# Altium footprint library Miscellaneous Devices.PcbLib: 306 footprints (part 1 of 20)
Each footprint in its own frame and in the unit in brackets; x right, y up, seen from the top. Pads: shape width x height; smd on the part's side, far side on the other; paste and mask are expansions set on the pad; w line width, h text height; cw(c..) or ccw(c..) is an arc to the next point about the centre after c.
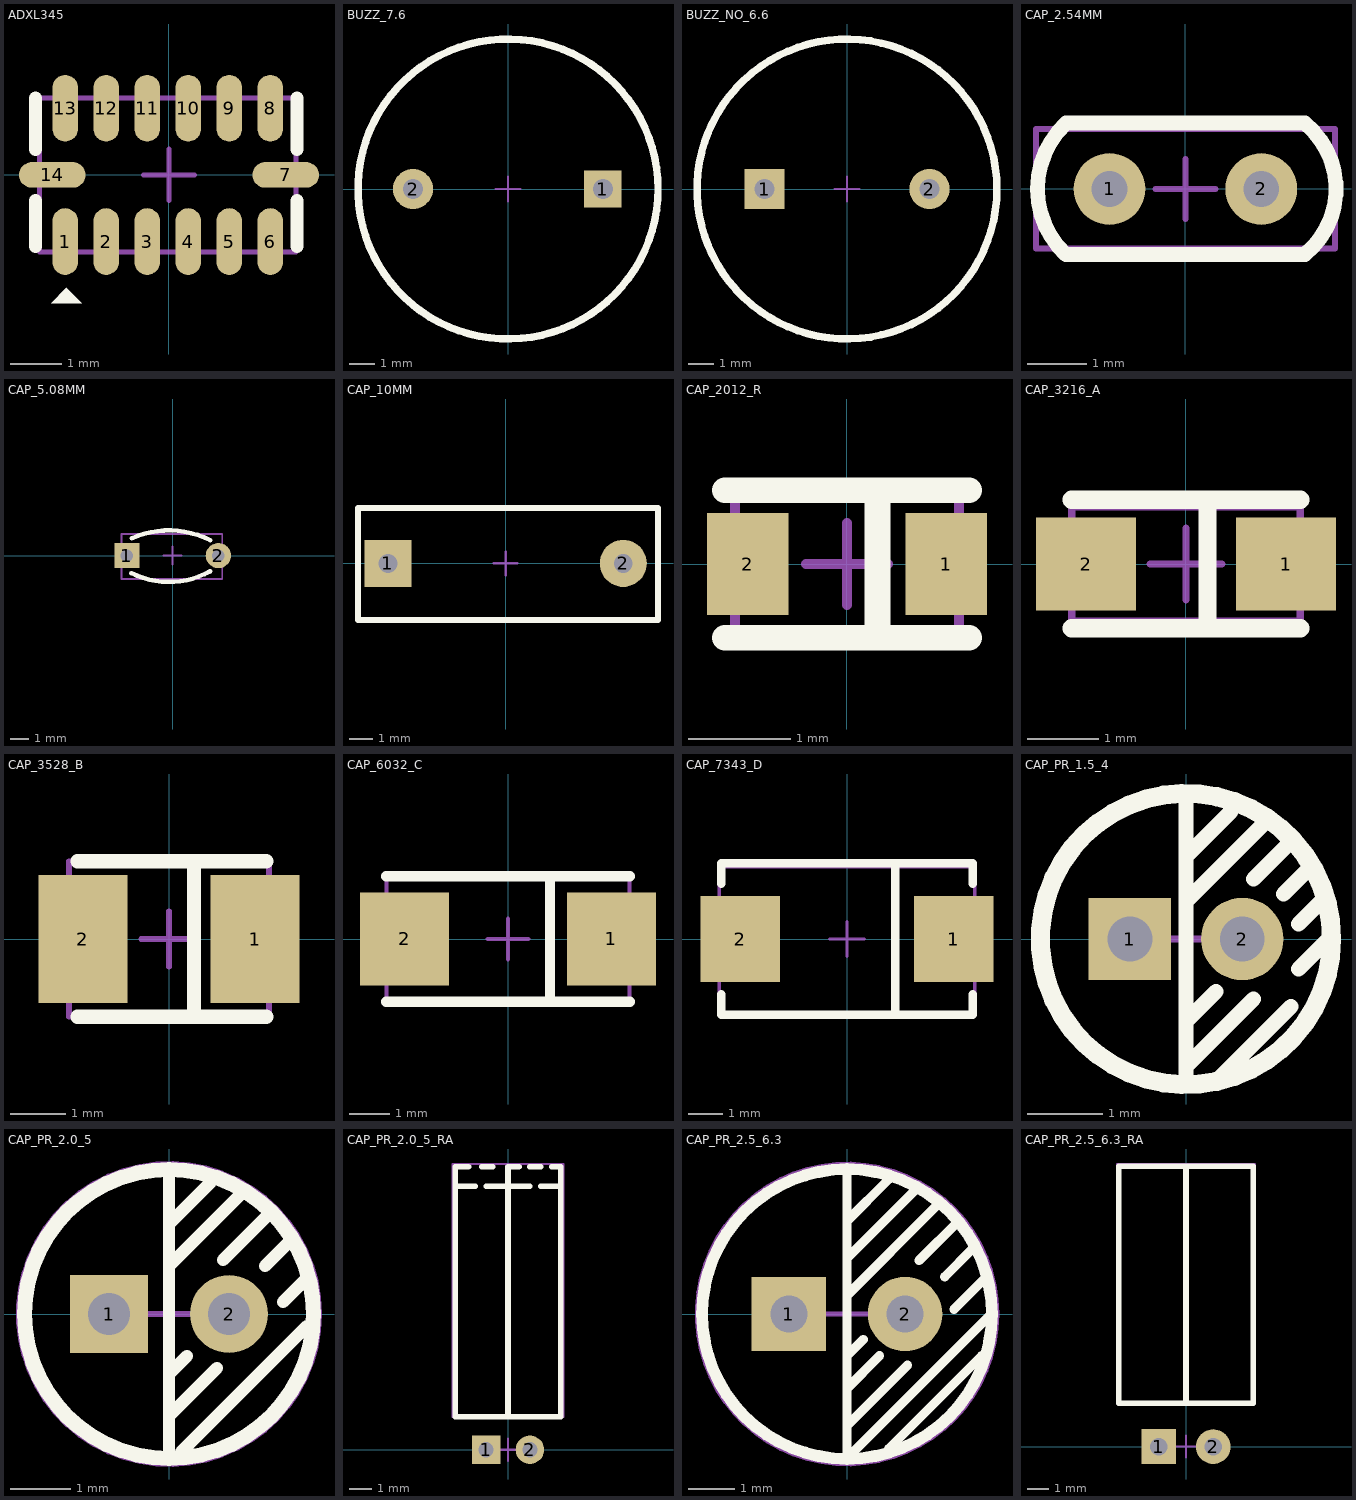
[diagram p0: the footprints below, top view; thin cyan lines are the x and y axes]

## ADXL345 [mm]
pads (14):
  oval 0.5x1.3 smd: 1(-2.025,-1.3) 2(-1.225,-1.3) 3(-0.425,-1.3) 4(0.375,-1.3) 5(1.175,-1.3) 6(1.975,-1.3) 8(1.975,1.3) 9(1.175,1.3) 10(0.375,1.3) 11(-0.425,1.3) 12(-1.225,1.3) 13(-2.025,1.3)
  oval 1.3x0.5 smd: 7(2.275,0) 14(-2.275,0)
Top Overlay:
  region: -2,-2.2 -2.3,-2.5 -1.7,-2.5
  lines w0.254: -2.6,-1.4 -2.6,-0.5 ; -2.6,0.5 -2.6,1.5 ; 2.5,-1.4 2.5,-0.5 ; 2.5,0.5 2.5,1.5
Mechanical 15:
  lines w0.1: -0.5,0 0.5,0 ; 0,-0.5 0,0.5 ; -2.525,-1.5 2.475,-1.5 2.475,1.5 -2.525,1.5 -2.525,-1.5
3D body: height 1, standoff 0, extent -2.525,-1.5 2.475,1.5

## BUZZ_7.6 [mm]
pads (2):
  rect 1.5x1.5 hole 0.8: 1(3.8,0)
  round 1.6 hole 0.8: 2(-3.8,0)
Top Overlay:
  circle w0.3: c0,0 r6
Mechanical 15:
  circle w0.1: c0,0 r6
  lines w0.1: -0.5,0 0.5,0 ; 0,-0.5 0,0.5
3D body: height 9.75, standoff -4.4, extent -6,-6 9.454,6

## BUZZ_NO_6.6 [mm]
pads (2):
  rect 1.6x1.6 hole 0.8: 1(-3.3,0)
  round 1.6 hole 0.8: 2(3.3,0)
Top Overlay:
  circle w0.3: c0,0 r6
Mechanical 15:
  circle w0.1: c0,0 r6.003
  lines w0.1: -0.5,0 0.5,0 ; 0,-0.5 0,0.5
3D body: height 8.6, standoff -5.4, extent -6,-6 6,6

## CAP_2.54MM [mm]
pads (2):
  round 1.2 hole 0.6: 1(-1.27,0) 2(1.27,0)
Top Overlay:
  lines w0.25: -2,1.097 ccw(c-0.972,-0.002) -2,-1.1 2,-1.1 ; -2,1.1 2,1.1 ; 1.999,-1.099 ccw(c1.1,0) 1.999,1.099
Mechanical 15:
  lines w0.1: -0.5,0 0.5,0 ; 0,-0.5 0,0.5 ; -2.5,-1 -2.5,1 2.5,1 2.5,-1 -2.5,-1
3D body: height 5.92, standoff -2, extent -2.919,-0.836 2.919,0.86

## CAP_5.08MM [mm]
pads (2):
  rect 1.4x1.4 hole 0.7: 1(-2.54,0)
  round 1.4 hole 0.7: 2(2.54,0)
Top Overlay:
  lines w0.254: -2.286,-0.972 ccw(c-0.2,3.2) 2.082,-0.868 ; -2.28,0.955 cw(c-0.2,-3.7) 2.08,0.861
Mechanical 15:
  lines w0.1: -0.5,0 0.5,0 ; 0,-0.5 0,0.5 ; -2.84,-1.3 2.76,-1.3 2.76,1.2 -2.84,1.2 -2.84,-1.3
3D body: height 6, standoff -3, extent -2.84,-1.3 2.76,1.2

## CAP_10MM [mm]
pads (2):
  rect 2x2 hole 0.8: 1(-5,0)
  round 2 hole 0.8: 2(5,0)
Top Overlay:
  lines w0.254: -6.275,-2.4 -6.275,2.351 6.475,2.351 6.475,-2.4 -6.275,-2.4
Mechanical 15:
  lines w0.1: -0.5,0 0.5,0 ; 0,-0.5 0,0.5 ; -6.275,-2.4 6.475,-2.4 6.475,2.351 -6.275,2.351 -6.275,-2.4
3D body: height 11.42, standoff -2.5, extent -6.275,-2.4 6.475,2.351

## CAP_2012_R [mm]
pads (2):
  rect 0.8x1 smd: 1(0.975,0) 2(-0.975,0)
Top Overlay:
  lines w0.254: -1.2,-0.725 1.2,-0.725 ; -1.2,0.725 1.2,0.725 ; 0.3,-0.725 0.3,0.725
Mechanical 15:
  lines w0.1: -0.4,0 0.4,0 ; 0,-0.4 0,0.4 ; -1.1,-0.7 -1.1,0.7 1.1,0.7 1.1,-0.7 -1.1,-0.7
3D body: height 1.35, standoff 0, extent -1.125,-0.65 1.125,0.7

## CAP_3216_A [mm]
pads (2):
  rect 1.4x1.3 smd: 1(1.4,0) 2(-1.4,0)
Top Overlay:
  lines w0.254: -1.6,-0.9 1.6,-0.9 ; -1.6,0.9 1.6,0.9 ; 0.3,-0.9 0.3,0.9
Mechanical 15:
  lines w0.1: -0.5,0 0.5,0 ; 0,-0.5 0,0.5 ; -1.6,-0.8 -1.6,0.8 1.6,0.8 1.6,-0.8 -1.6,-0.8
3D body: height 1.6, standoff 0, extent -1.6,-0.8 1.6,0.8

## CAP_3528_B [mm]
pads (2):
  rect 1.6x2.3 smd: 1(1.55,0) 2(-1.55,0)
Top Overlay:
  lines w0.254: -1.65,-1.4 1.75,-1.4 ; -1.65,1.4 1.75,1.4 ; 0.45,-1.4 0.45,1.4
Mechanical 15:
  lines w0.1: -0.5,0 0.5,0 ; 0,-0.5 0,0.5 ; -1.8,-1.4 -1.8,1.4 1.8,1.4 1.8,-1.4 -1.8,-1.4
3D body: height 1.9, standoff 0, extent -1.75,-1.4 1.75,1.4

## CAP_6032_C [mm]
pads (2):
  rect 2.2x2.3 smd: 1(2.55,0) 2(-2.55,0)
Top Overlay:
  lines w0.254: -3,-1.55 3,-1.55 ; -3,1.55 3,1.55 ; 1.036,-1.55 1.036,1.55
Mechanical 15:
  lines w0.1: -0.5,0 0.5,0 ; 0,-0.5 0,0.5 ; -3,-1.6 -3,1.6 3,1.6 3,-1.6 -3,-1.6
3D body: height 2.5, standoff 0, extent -3,-1.6 3,1.6

## CAP_7343_D [mm]
pads (2):
  rect 2.3x2.5 smd: 1(3.1,0) 2(-3.1,0)
Top Overlay:
  lines w0.254: -3.65,-1.6 -3.65,-2.2 3.65,-2.2 3.65,-1.6 ; -3.65,1.6 -3.65,2.2 3.65,2.2 3.65,1.6 ; 1.4,-2.2 1.4,2.2
Mechanical 15:
  lines w0.1: -0.5,0 0.5,0 ; 0,-0.5 0,0.5 ; -3.7,-2.2 3.7,-2.2 3.7,2.1 -3.7,2.1 -3.7,-2.2
3D body: height 2.8, standoff 0, extent -3.65,-2.2 3.65,2.1

## CAP_PR_1.5_4 [mm] "4X7"
pads (2):
  rect 1.1x1.1 hole 0.6: 1(-0.75,0)
  round 1.1 hole 0.6: 2(0.75,0)
Top Overlay:
  circle w0.254: c0,0 r1.942
  lines w0.2: 0,-1.9 0,1.9 ; 0,-1.7 0.9,-0.8 ; 0,-1.1 0.4,-0.7 ; 0,0.5 1.1,1.6 ; 0,1.1 0.6,1.7 ; 0.4,-1.9 1.4,-0.9 ; 0.9,0.8 1.4,1.3 ; 1.5,-0.4 1.9,0 ; 1.5,0.2 1.8,0.5 ; 1.6,0.9 1.3,0.6 ; 1.3,0.6 1.3,0.6
Mechanical 15:
  circle w0.1: c0,0 r2
  lines w0.1: -0.5,0 0.5,0 ; 0,-0.5 0,0.5
3D body: height 7.1, standoff -5.4, extent -2,-1.999 2,2

## CAP_PR_2.0_5 [mm] "5X11"
pads (2):
  rect 1.3x1.3 hole 0.7: 1(-1,0)
  round 1.3 hole 0.7: 2(1,0)
Top Overlay:
  circle w0.254: c0,0 r2.408
  lines w0.2: 0,-2.3 0,2.4 ; 0,-1.7 0.8,-0.9 ; 0,-1.1 0,-1 ; 0,0.8 1.2,2 ; 0.2,-2.3 2.3,-0.2 ; 0.3,-0.7 0,-1 ; 0.7,2.2 0,1.5 ; 0.9,0.9 1.7,1.7 ; 1.6,0.8 2,1.2 ; 1.9,0.2 2.3,0.6 ; 0,-1 0,-1 ; 0,1.5 0,1.5 ; 2,1.2 2,1.2 ; 2.3,0.6 2.3,0.6
Mechanical 15:
  circle w0.1: c0,0 r2.5
  lines w0.1: -0.5,0 0.5,0 ; 0,-0.5 0,0.5
3D body: height 11.3, standoff -5.5, extent -2.5,-2.478 2.5,2.5

## CAP_PR_2.0_5_RA [mm] "5X11"
pads (2):
  rect 1.3x1.3 hole 0.7: 1(-1,0)
  round 1.3 hole 0.7: 2(1,0)
Top Overlay:
  lines w0.254: -2.4,12 -1.5,12 ; -1.8,12.9 -2.4,12.9 -2.4,1.5 2.4,1.5 2.4,12.9 2,12.9 ; -1.2,12.9 -0.7,12.9 ; -1,12 0,12 1,12 ; 0,1.5 0,12.9 0.5,12.9 ; 1,12.9 1.5,12.9 ; 1.5,12 2.4,12
Mechanical 15:
  lines w0.1: -0.5,0 0.5,0 ; 0,-0.5 0,0.5 ; -2.525,1.5 2.525,1.5 2.525,13.021 -2.525,13.021 -2.525,1.5
3D body: height 5.03, standoff -3.5, extent -2.525,-0.3 2.525,13.021

## CAP_PR_2.5_6.3 [mm] "6.3X11"
pads (2):
  rect 1.6x1.6 hole 0.8: 1(-1.25,0)
  round 1.6 hole 0.8: 2(1.25,0)
Top Overlay:
  circle w0.254: c0,0 r3.114
  lines w0.2: 0,-2.4 1.3,-1.1 ; 0,-1.6 0.7,-0.9 ; 0,0.4 1.9,2.3 ; 0,1.2 1.5,2.7 ; 0,3.1 0,-3.1 3.1,0 3.114,0 ; 0.35,-0.55 0,-0.9 ; 0.9,-2.9 2.9,-0.9 ; 0.9,2.9 0,2 ; 1.55,1.15 2.4,2 ; 2.1,0.8 2.7,1.4 ; 2.3,0.1 3,0.8 ; 0,-0.9 0,-0.9 ; 0,2 0,2 ; 3,0.8 3,0.8
Mechanical 15:
  circle w0.1: c0,0 r3.225
  lines w0.1: -0.5,0 0.5,0 ; 0,-0.5 0,0.5
3D body: height 11.3, standoff -5.5, extent -3.225,-3.149 3.125,3.2

## CAP_PR_2.5_6.3_RA [mm] "6.3X11"
pads (2):
  rect 1.6x1.6 hole 0.8: 1(-1.25,0)
  round 1.6 hole 0.8: 2(1.25,0)
Top Overlay:
  lines w0.254: 0,2 0,12.9 ; -3.1,2 -3.1,12.9 3.1,12.9 3.1,2 -3.1,2
Mechanical 15:
  lines w0.1: -0.5,0 0.5,0 ; 0,-0.5 0,0.5 ; -3.175,2 3.175,2 3.175,13 -3.175,13 -3.175,2
3D body: height 6.38, standoff -2.8, extent -3.175,-0.3 3.175,13.021